# Altium footprint library BOURNS_CDSOT23_SM712.PcbLib: 1 footprints
Each footprint in its own frame and in the unit in brackets; x right, y up, seen from the top. Pads: shape width x height; smd on the part's side, far side on the other; paste and mask are expansions set on the pad; w line width, h text height; cw(c..) or ccw(c..) is an arc to the next point about the centre after c.
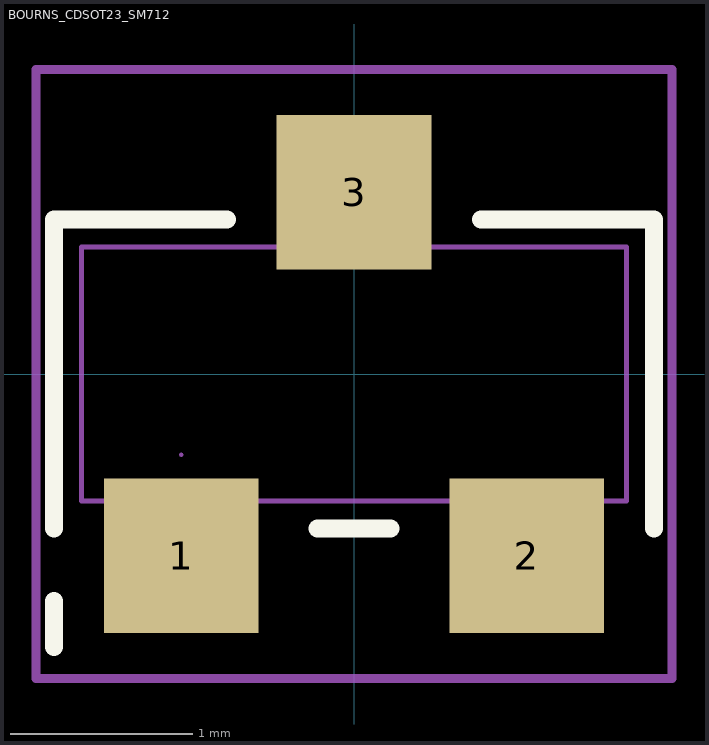
[diagram p0: the footprint, top view; thin cyan lines are the x and y axes]

## BOURNS_CDSOT23_SM712 [mm] "Bourns CDSOT23-SM712 datasheet land pattern; pads0.85x0.85mm, rows2.0mm, pitch1.90mm; UL STEP"
height 1.17
pads (3):
  rect 0.85x0.85 smd paste+0 mask+0.05: 1(-0.95,-1) 2(0.95,-1) 3(0,1)
Top Overlay:
  lines w0.1: -1.65,-1.5 -1.65,-1.25 ; -1.65,-0.85 -1.65,0.85 -0.7,0.85 ; -0.2,-0.85 0.2,-0.85 ; 0.7,0.85 1.65,0.85 1.65,-0.85
Mechanical 13:
  circle w0.025: c-0.95,-0.445 r0
  lines w0.025: -1.499,-0.699 1.499,-0.699 1.499,0.699 -1.499,0.699 -1.499,-0.699 ; -1.204,-1.245 -1.204,-0.699 -0.696,-0.699 -0.696,-1.245 -1.204,-1.245 ; -0.254,0.699 0.254,0.699 0.254,1.245 -0.254,1.245 -0.254,0.699 ; 0.696,-1.245 0.696,-0.699 1.204,-0.699 1.204,-1.245 0.696,-1.245
  text ".Designator" at -3.492,-0.635 h1.27
Mechanical 15:
  lines w0.05: -1.75,-1.675 1.75,-1.675 1.75,1.675 -1.75,1.675 -1.75,-1.675
3D body "SOT_SM712.step": height 1.17, standoff 0, extent -1.499,-1.245 1.499,1.245